# Altium footprint library ICs_VendorSpecific.PcbLib: 247 footprints (part 18 of 19)
Each footprint in its own frame and in the unit in brackets; x right, y up, seen from the top. Pads: shape width x height; smd on the part's side, far side on the other; paste and mask are expansions set on the pad; w line width, h text height; cw(c..) or ccw(c..) is an arc to the next point about the centre after c.
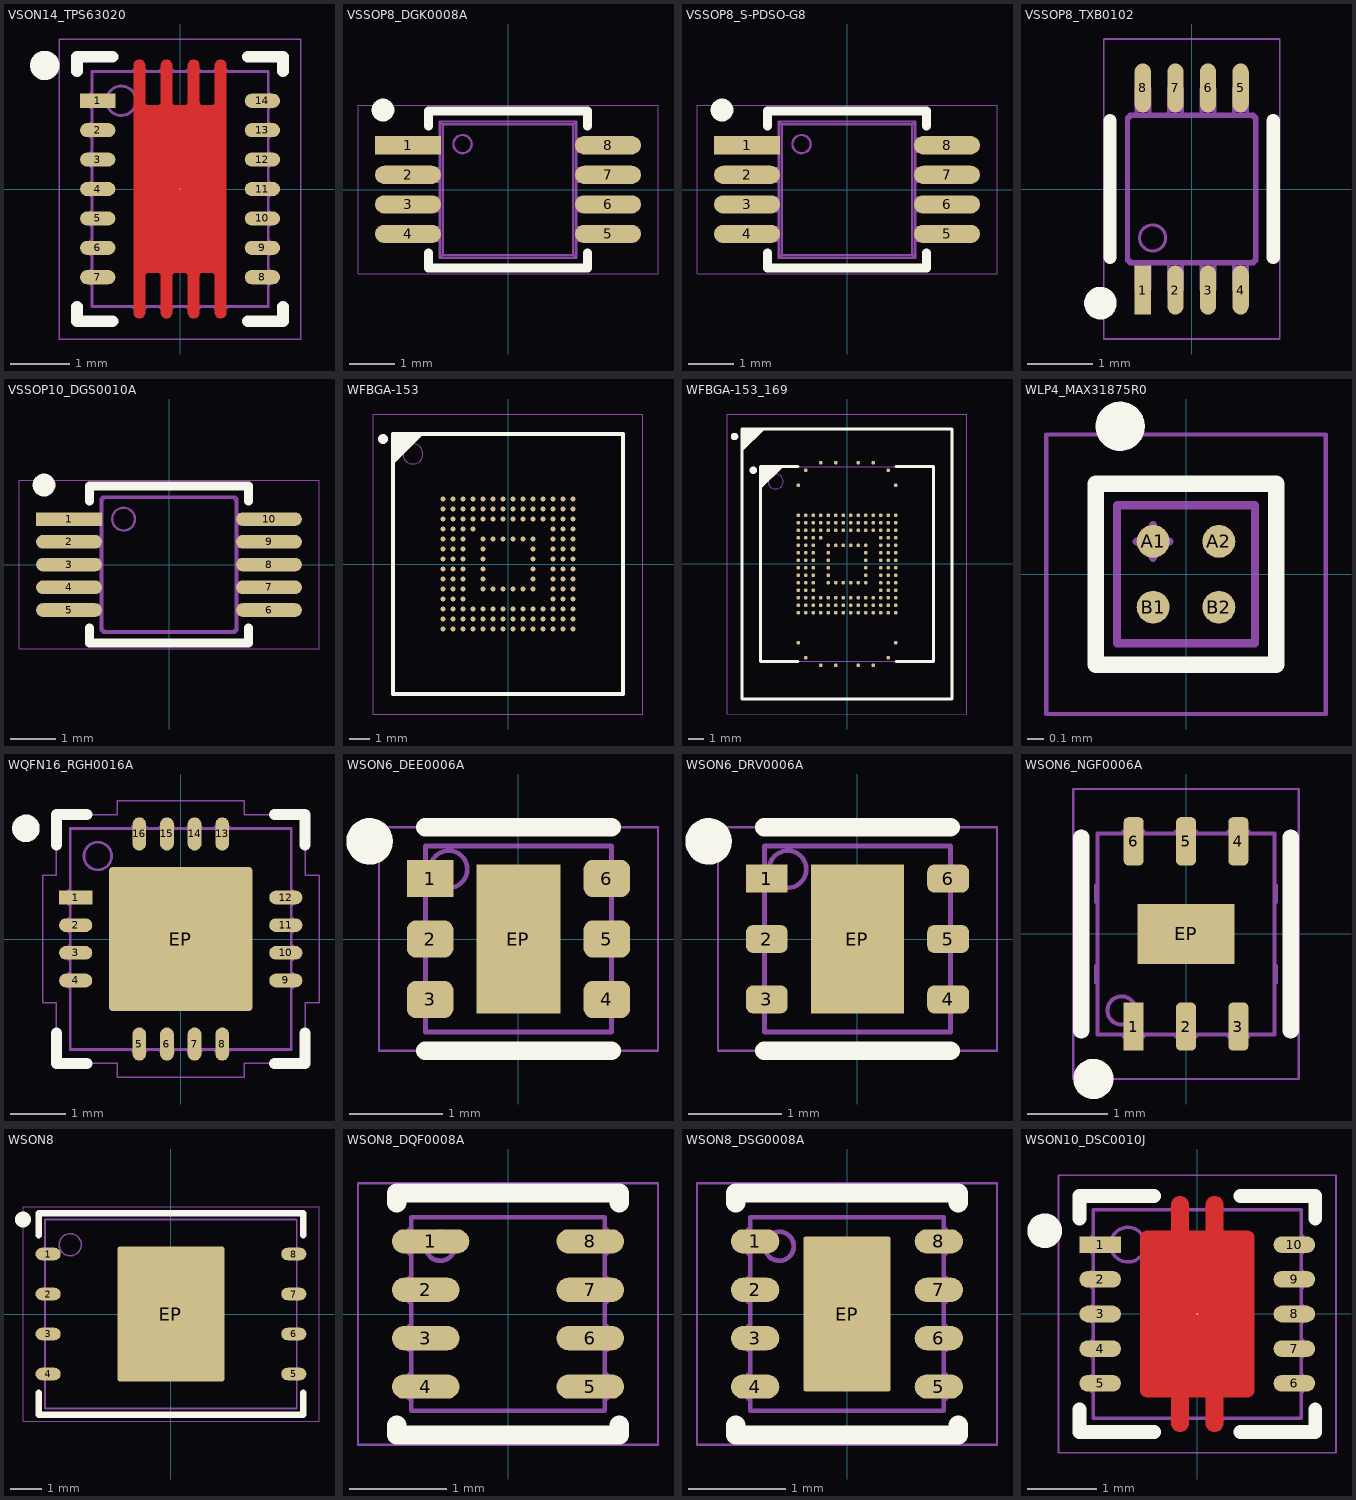
[diagram p17: the footprints below, top view; thin cyan lines are the x and y axes]

## VSON14_TPS63020 [mm] "VSON, 14-Leads, Body 3.00x4.00mm, Exposed Pad 1.58x2.85mm, Pitch 0.5mm. TI case style R-PVSON-N14"
height 1
pads (15):
  rect 0.6x0.24 smd paste+0 mask+0.05: 1(-1.4,1.5)
  oval 0.6x0.24 smd paste+0 mask+0.05: 2(-1.4,1) 3(-1.4,0.5) 4(-1.4,0) 5(-1.4,-0.5) 6(-1.4,-1) 7(-1.4,-1.5) 8(1.4,-1.5) 9(1.4,-1) 10(1.4,-0.5) 11(1.4,0) 12(1.4,0.5) 13(1.4,1) 14(1.4,1.5)
  round 0.025 smd paste-2 mask+0.05: EP(0,0)
Top Layer:
  region: 184 vertices and 0 holes, not listed, extent -0.79,-2.2 0.79,2.2
Top Overlay:
  circle w0.25: c-2.3,2.1 r0.125
  lines w0.2: -1.75,-2 -1.75,-2.25 -1.15,-2.25 ; -1.75,2 -1.75,2.25 -1.15,2.25 ; 1.15,-2.25 1.75,-2.25 1.75,-2 ; 1.15,2.25 1.75,2.25 1.75,2
Top Paste:
  drawing of 12 lines, arcs and shapes, not listed
Top Courtyard:
  lines w0.025: -2.05,-2.55 -2.05,2.55 2.05,2.55 2.05,-2.55 -2.05,-2.55
Top Assembly:
  circle w0.05: c-1,1.5 r0.25
  lines w0.05: -1.5,-1.62 -1.52,-1.62 -1.52,-1.38 -1.5,-1.38 ; -1.5,-1.12 -1.52,-1.12 -1.52,-0.88 -1.5,-0.88 ; -1.5,-0.62 -1.52,-0.62 -1.52,-0.38 -1.5,-0.38 ; -1.5,-0.12 -1.52,-0.12 -1.52,0.12 -1.5,0.12 ; -1.5,0.38 -1.52,0.38 -1.52,0.62 -1.5,0.62 ; -1.5,0.88 -1.52,0.88 -1.52,1.12 -1.5,1.12 ; -1.5,1.38 -1.52,1.38 -1.52,1.62 -1.5,1.62 ; -0.79,-2 -0.79,-2.02 -0.59,-2.02 -0.59,-2 ; -0.79,2 -0.79,2.02 -0.59,2.02 -0.59,2 ; -0.33,-2 -0.33,-2.02 -0.13,-2.02 -0.13,-2 ; -0.33,2 -0.33,2.02 -0.13,2.02 -0.13,2 ; 0.13,-2 0.13,-2.02 0.33,-2.02 0.33,-2 ; 0.13,2 0.13,2.02 0.33,2.02 0.33,2 ; 0.59,-2 0.59,-2.02 0.79,-2.02 0.79,-2 ; 0.59,2 0.59,2.02 0.79,2.02 0.79,2 ; 1.5,-1.62 1.52,-1.62 1.52,-1.38 1.5,-1.38 ; 1.5,-1.12 1.52,-1.12 1.52,-0.88 1.5,-0.88 ; 1.5,-0.62 1.52,-0.62 1.52,-0.38 1.5,-0.38 ; 1.5,-0.12 1.52,-0.12 1.52,0.12 1.5,0.12 ; 1.5,0.38 1.52,0.38 1.52,0.62 1.5,0.62 ; 1.5,0.88 1.52,0.88 1.52,1.12 1.5,1.12 ; 1.5,1.38 1.52,1.38 1.52,1.62 1.5,1.62 ; -1.5,-2 -1.5,2 1.5,2 1.5,-2 -1.5,-2
  text ".Designator" at 0.339,-3.378 h1.5
3D body "R-PVSON-N14.x_t": height 1.02, standoff 0, extent -1.52,-2.02 1.52,2.02

## VSSOP8_DGK0008A [mm] "MSOP, 8-Leads, Body 3.00x3.00mm, Pitch 0.65mm, TI case DGK0008A"
height 1.1
pads (8):
  rect 1.45x0.4 smd paste+0 mask+0.05: 1(-2.2,0.975)
  oval 1.45x0.4 smd paste+0 mask+0.05: 2(-2.2,0.325) 3(-2.2,-0.325) 4(-2.2,-0.975) 5(2.2,-0.975) 6(2.2,-0.325) 7(2.2,0.325) 8(2.2,0.975)
Top Overlay:
  circle w0.25: c-2.75,1.75 r0.125
  lines w0.2: -1.75,-1.4 -1.75,-1.725 1.75,-1.725 1.75,-1.4 ; -1.75,1.4 -1.75,1.725 1.75,1.725 1.75,1.4
Top Courtyard:
  lines w0.025: -3.3,-1.85 3.3,-1.85 3.3,1.85 -3.3,1.85 -3.3,-1.85
Top Assembly:
  circle w0.05: c-1,1 r0.2
  lines w0.05: -2.1,-1.125 -2,-1.125 ; -2.1,-1.125 -2.1,-0.825 ; -2.1,-1.125 -2.5,-1.125 -2.5,-0.825 -2.1,-0.825 ; -2.1,-0.825 -2,-0.825 ; -2.1,-0.475 -2,-0.475 ; -2.1,-0.475 -2.1,-0.175 ; -2.1,-0.475 -2.5,-0.475 -2.5,-0.175 -2.1,-0.175 ; -2.1,-0.175 -2,-0.175 ; -2.1,0.175 -2,0.175 ; -2.1,0.175 -2.1,0.475 ; -2.1,0.175 -2.5,0.175 -2.5,0.475 -2.1,0.475 ; -2.1,0.475 -2,0.475 ; -2.1,0.825 -2,0.825 ; -2.1,0.825 -2.1,1.125 ; -2.1,0.825 -2.5,0.825 -2.5,1.125 -2.1,1.125 ; -2.1,1.125 -2,1.125 ; -2,-1.125 -1.8,-1.125 ; -2,-1.125 -2,-0.825 ; -2,-0.825 -1.8,-0.825 ; -2,-0.475 -1.8,-0.475 ; -2,-0.475 -2,-0.175 ; -2,-0.175 -1.8,-0.175 ; -2,0.175 -1.8,0.175 ; -2,0.175 -2,0.475 ; -2,0.475 -1.8,0.475 ; -2,0.825 -1.8,0.825 ; -2,0.825 -2,1.125 ; -2,1.125 -1.8,1.125 ; -1.8,-1.125 -1.8,-0.825 ; -1.8,-1.125 -1.5,-1.125 ; -1.8,-0.825 -1.5,-0.825 ; -1.8,-0.475 -1.8,-0.175 ; -1.8,-0.475 -1.5,-0.475 ; -1.8,-0.175 -1.5,-0.175 ; -1.8,0.175 -1.8,0.475 ; -1.8,0.175 -1.5,0.175 ; -1.8,0.475 -1.5,0.475 ; -1.8,0.825 -1.8,1.125 ; -1.8,0.825 -1.5,0.825 ; -1.8,1.125 -1.5,1.125 ; -1.5,-1.5 1.5,-1.5 ; -1.5,-1.5 -1.438,-1.438 ; -1.5,-1.5 -1.5,-1.125 ; -1.5,-1.125 -1.5,-0.825 ; -1.5,-0.825 -1.5,-0.475 ; -1.5,-0.475 -1.5,-0.175 ; -1.5,-0.175 -1.5,0.175 ; -1.5,0.175 -1.5,0.475 ; -1.5,0.475 -1.5,0.825 ; -1.5,0.825 -1.5,1.125 ; -1.5,1.125 -1.5,1.5 ; -1.5,1.5 1.5,1.5 ; -1.5,1.5 -1.438,1.438 ; -1.438,-1.438 1.438,-1.438 ; -1.438,-1.438 -1.438,1.438 ; -1.438,1.438 1.438,1.438 ; 1.438,-1.438 1.438,1.438 ; 1.438,-1.438 1.5,-1.5 ; 1.438,1.438 1.5,1.5 ; 1.5,-1.5 1.5,-1.125 ; 1.5,-1.125 1.8,-1.125 ; 1.5,-1.125 1.5,-0.825 ; 1.5,-0.825 1.8,-0.825 ; 1.5,-0.825 1.5,-0.475 ; 1.5,-0.475 1.8,-0.475 ; 1.5,-0.475 1.5,-0.175 ; 1.5,-0.175 1.5,0.175 ; 1.5,-0.175 1.8,-0.175 ; 1.5,0.175 1.8,0.175 ; 1.5,0.175 1.5,0.475 ; 1.5,0.475 1.8,0.475 ; 1.5,0.475 1.5,0.825 ; 1.5,0.825 1.8,0.825 ; 1.5,0.825 1.5,1.125 ; 1.5,1.125 1.8,1.125 ; 1.5,1.125 1.5,1.5 ; 1.8,-1.125 1.8,-0.825 ; 1.8,-1.125 2,-1.125 ; 1.8,-0.825 2,-0.825 ; 1.8,-0.475 1.8,-0.175 ; 1.8,-0.475 2,-0.475 ; 1.8,-0.175 2,-0.175 ; 1.8,0.175 1.8,0.475 ; 1.8,0.175 2,0.175 ; 1.8,0.475 2,0.475 ; 1.8,0.825 1.8,1.125 ; 1.8,0.825 2,0.825 ; 1.8,1.125 2,1.125 ; 2,-1.125 2.1,-1.125 ; 2,-1.125 2,-0.825 ; 2,-0.825 2.1,-0.825 ; 2,-0.475 2.1,-0.475 ; 2,-0.475 2,-0.175 ; 2,-0.175 2.1,-0.175 ; 2,0.175 2.1,0.175 ; 2,0.175 2,0.475 ; 2,0.475 2.1,0.475 ; 2,0.825 2.1,0.825 ; 2,0.825 2,1.125 ; 2,1.125 2.1,1.125 ; 2.1,-1.125 2.1,-0.825 ; 2.1,-1.125 2.5,-1.125 2.5,-0.825 2.1,-0.825 ; 2.1,-0.475 2.1,-0.175 ; 2.1,-0.475 2.5,-0.475 2.5,-0.175 2.1,-0.175 ; 2.1,0.175 2.1,0.475 ; 2.1,0.175 2.5,0.175 2.5,0.475 2.1,0.475 ; 2.1,0.825 2.1,1.125 ; 2.1,0.825 2.5,0.825 2.5,1.125 2.1,1.125
  text ".Designator" at -3.378,-0.339 h1.5
3D body "VSSOP-8(DGK0008A)_X_T.x_t": height 1.18, standoff -0.02, extent -2.45,-1.5 2.45,1.5

## VSSOP8_S-PDSO-G8 [mm] "MSOP, 8-Leads, Body 3.00x3.00mm, Pitch 0.65mm, TI case S-PDSO-G8"
height 1.1
pads (8):
  rect 1.45x0.4 smd paste+0 mask+0.05: 1(-2.2,0.975)
  oval 1.45x0.4 smd paste+0 mask+0.05: 2(-2.2,0.325) 3(-2.2,-0.325) 4(-2.2,-0.975) 5(2.2,-0.975) 6(2.2,-0.325) 7(2.2,0.325) 8(2.2,0.975)
Top Overlay:
  circle w0.25: c-2.75,1.75 r0.125
  lines w0.2: -1.75,-1.4 -1.75,-1.725 1.75,-1.725 1.75,-1.4 ; -1.75,1.4 -1.75,1.725 1.75,1.725 1.75,1.4
Top Courtyard:
  lines w0.025: -3.3,-1.85 -3.3,1.85 3.3,1.85 3.3,-1.85 -3.3,-1.85
Top Assembly:
  circle w0.05: c-1,1 r0.2
  lines w0.05: -2.1,-1.125 -2.5,-1.125 -2.5,-0.825 -2.1,-0.825 ; -2.1,-1.125 -2.1,-0.825 ; -2.1,-1.125 -2,-1.125 ; -2.1,-0.825 -2,-0.825 ; -2.1,-0.475 -2.5,-0.475 -2.5,-0.175 -2.1,-0.175 ; -2.1,-0.475 -2.1,-0.175 ; -2.1,-0.475 -2,-0.475 ; -2.1,-0.175 -2,-0.175 ; -2.1,0.175 -2.5,0.175 -2.5,0.475 -2.1,0.475 ; -2.1,0.175 -2.1,0.475 ; -2.1,0.175 -2,0.175 ; -2.1,0.475 -2,0.475 ; -2.1,0.825 -2.5,0.825 -2.5,1.125 -2.1,1.125 ; -2.1,0.825 -2.1,1.125 ; -2.1,0.825 -2,0.825 ; -2.1,1.125 -2,1.125 ; -2,-1.125 -2,-0.825 ; -2,-1.125 -1.8,-1.125 ; -2,-0.825 -1.8,-0.825 ; -2,-0.475 -2,-0.175 ; -2,-0.475 -1.8,-0.475 ; -2,-0.175 -1.8,-0.175 ; -2,0.175 -2,0.475 ; -2,0.175 -1.8,0.175 ; -2,0.475 -1.8,0.475 ; -2,0.825 -2,1.125 ; -2,0.825 -1.8,0.825 ; -2,1.125 -1.8,1.125 ; -1.8,-1.125 -1.5,-1.125 ; -1.8,-1.125 -1.8,-0.825 ; -1.8,-0.825 -1.5,-0.825 ; -1.8,-0.475 -1.5,-0.475 ; -1.8,-0.475 -1.8,-0.175 ; -1.8,-0.175 -1.5,-0.175 ; -1.8,0.175 -1.5,0.175 ; -1.8,0.175 -1.8,0.475 ; -1.8,0.475 -1.5,0.475 ; -1.8,0.825 -1.5,0.825 ; -1.8,0.825 -1.8,1.125 ; -1.8,1.125 -1.5,1.125 ; -1.5,-1.5 -1.5,-1.125 ; -1.5,-1.5 -1.438,-1.438 ; -1.5,-1.5 1.5,-1.5 ; -1.5,-1.125 -1.5,-0.825 ; -1.5,-0.825 -1.5,-0.475 ; -1.5,-0.475 -1.5,-0.175 ; -1.5,-0.175 -1.5,0.175 ; -1.5,0.175 -1.5,0.475 ; -1.5,0.475 -1.5,0.825 ; -1.5,0.825 -1.5,1.125 ; -1.5,1.125 -1.5,1.5 ; -1.5,1.5 -1.438,1.438 ; -1.5,1.5 1.5,1.5 ; -1.438,-1.438 -1.438,1.438 ; -1.438,-1.438 1.438,-1.438 ; -1.438,1.438 1.438,1.438 ; 1.438,-1.438 1.5,-1.5 ; 1.438,-1.438 1.438,1.438 ; 1.438,1.438 1.5,1.5 ; 1.5,-1.5 1.5,-1.125 ; 1.5,-1.125 1.5,-0.825 ; 1.5,-1.125 1.8,-1.125 ; 1.5,-0.825 1.5,-0.475 ; 1.5,-0.825 1.8,-0.825 ; 1.5,-0.475 1.5,-0.175 ; 1.5,-0.475 1.8,-0.475 ; 1.5,-0.175 1.8,-0.175 ; 1.5,-0.175 1.5,0.175 ; 1.5,0.175 1.5,0.475 ; 1.5,0.175 1.8,0.175 ; 1.5,0.475 1.5,0.825 ; 1.5,0.475 1.8,0.475 ; 1.5,0.825 1.5,1.125 ; 1.5,0.825 1.8,0.825 ; 1.5,1.125 1.5,1.5 ; 1.5,1.125 1.8,1.125 ; 1.8,-1.125 2,-1.125 ; 1.8,-1.125 1.8,-0.825 ; 1.8,-0.825 2,-0.825 ; 1.8,-0.475 2,-0.475 ; 1.8,-0.475 1.8,-0.175 ; 1.8,-0.175 2,-0.175 ; 1.8,0.175 2,0.175 ; 1.8,0.175 1.8,0.475 ; 1.8,0.475 2,0.475 ; 1.8,0.825 2,0.825 ; 1.8,0.825 1.8,1.125 ; 1.8,1.125 2,1.125 ; 2,-1.125 2,-0.825 ; 2,-1.125 2.1,-1.125 ; 2,-0.825 2.1,-0.825 ; 2,-0.475 2,-0.175 ; 2,-0.475 2.1,-0.475 ; 2,-0.175 2.1,-0.175 ; 2,0.175 2,0.475 ; 2,0.175 2.1,0.175 ; 2,0.475 2.1,0.475 ; 2,0.825 2,1.125 ; 2,0.825 2.1,0.825 ; 2,1.125 2.1,1.125 ; 2.1,-1.125 2.5,-1.125 2.5,-0.825 2.1,-0.825 ; 2.1,-1.125 2.1,-0.825 ; 2.1,-0.475 2.5,-0.475 2.5,-0.175 2.1,-0.175 ; 2.1,-0.475 2.1,-0.175 ; 2.1,0.175 2.5,0.175 2.5,0.475 2.1,0.475 ; 2.1,0.175 2.1,0.475 ; 2.1,0.825 2.5,0.825 2.5,1.125 2.1,1.125 ; 2.1,0.825 2.1,1.125
  text ".Designator" at -3.378,-0.339 h1.5
3D body "VSSOP-8(S-PDSO-S8)_X_T.x_t": height 1.18, standoff -0.02, extent -2.45,-1.5 2.45,1.5

## VSSOP8_TXB0102 [mm] "VSSOP, 8-Leads, Body 2.00x2.30mm, Pitch 0.5mm, TI Ref S-PDSO-G8"
height 0.75
pads (8):
  rect 0.25x0.75 smd paste+0 mask+0.05: 1(-0.75,-1.55)
  oval 0.25x0.75 smd paste+0 mask+0.05: 2(-0.25,-1.55) 3(0.25,-1.55) 4(0.75,-1.55) 5(0.75,1.55) 6(0.25,1.55) 7(-0.25,1.55) 8(-0.75,1.55)
Top Overlay:
  circle w0.25: c-1.4,-1.75 r0.125
  lines w0.2: -1.25,-1.05 -1.25,1.05 ; 1.25,-1.05 1.25,1.05
Top Courtyard:
  lines w0.025: -1.35,-2.3 -1.35,2.3 1.35,2.3 1.35,-2.3 -1.35,-2.3
Top Assembly:
  circle w0.05: c-0.6,-0.75 r0.2
  lines w0.05: -0.949,-1.15 -0.917,-1.117 ; -0.949,1.15 -0.917,1.117 ; -0.855,-1.452 -0.645,-1.452 ; -0.855,-1.392 -0.645,-1.392 ; -0.855,-1.335 -0.645,-1.335 ; -0.855,-1.208 -0.645,-1.208 ; -0.855,-1.15 -0.855,-1.55 -0.645,-1.55 -0.645,-1.15 ; -0.855,1.15 -0.855,1.55 -0.645,1.55 -0.645,1.15 ; -0.855,1.208 -0.645,1.208 ; -0.855,1.335 -0.645,1.335 ; -0.855,1.392 -0.645,1.392 ; -0.855,1.452 -0.645,1.452 ; -0.355,-1.452 -0.145,-1.452 ; -0.355,-1.392 -0.145,-1.392 ; -0.355,-1.335 -0.145,-1.335 ; -0.355,-1.208 -0.145,-1.208 ; -0.355,-1.15 -0.355,-1.55 -0.145,-1.55 -0.145,-1.15 ; -0.355,1.15 -0.355,1.55 -0.145,1.55 -0.145,1.15 ; -0.355,1.208 -0.145,1.208 ; -0.355,1.335 -0.145,1.335 ; -0.355,1.392 -0.145,1.392 ; -0.355,1.452 -0.145,1.452 ; 0.145,-1.452 0.355,-1.452 ; 0.145,-1.392 0.355,-1.392 ; 0.145,-1.335 0.355,-1.335 ; 0.145,-1.208 0.355,-1.208 ; 0.145,-1.15 0.145,-1.55 0.355,-1.55 0.355,-1.15 ; 0.145,1.15 0.145,1.55 0.355,1.55 0.355,1.15 ; 0.145,1.208 0.355,1.208 ; 0.145,1.335 0.355,1.335 ; 0.145,1.392 0.355,1.392 ; 0.145,1.452 0.355,1.452 ; 0.645,-1.452 0.855,-1.452 ; 0.645,-1.392 0.855,-1.392 ; 0.645,-1.335 0.855,-1.335 ; 0.645,-1.208 0.855,-1.208 ; 0.645,-1.15 0.645,-1.55 0.855,-1.55 0.855,-1.15 ; 0.645,1.15 0.645,1.55 0.855,1.55 0.855,1.15 ; 0.645,1.208 0.855,1.208 ; 0.645,1.335 0.855,1.335 ; 0.645,1.392 0.855,1.392 ; 0.645,1.452 0.855,1.452 ; 1,-1.099 0.967,-1.067 ; 1,1.099 0.967,1.067 ; -1,-1.1 -1,1.1 ; -1,-1.1 -0.967,-1.067 ; -1,-1.1 -0.95,-1.15 0.95,-1.15 ; -1,1.1 -0.95,1.15 0.95,1.15 ; -1,1.1 -0.967,1.067 ; -0.967,-1.067 -0.967,1.067 ; -0.967,-1.067 -0.917,-1.117 ; -0.967,1.067 -0.917,1.117 ; -0.917,-1.117 0.917,-1.117 ; -0.917,1.117 0.917,1.117 ; 0.917,-1.117 0.967,-1.067 ; 0.917,-1.117 0.95,-1.15 ; 0.917,1.117 0.95,1.15 ; 0.917,1.117 0.967,1.067 ; 0.95,-1.15 1,-1.1 1,1.1 0.95,1.15 ; 0.967,-1.067 0.967,1.067
  text ".Designator" at -3.378,-0.339 h1.5
3D body "VSSOP8_R-PDSO-G8.x_t": height 0.87, standoff 0, extent -1,-1.55 1,1.55

## VSSOP10_DGS0010A [mm] "VSSOP, 10-Leads, Body 3.00x3.00mm, Pitch 0.5mm, TI case DGS0010A"
height 1
pads (10):
  rect 1.45x0.3 smd paste+0 mask+0.05: 1(-2.2,1)
  oval 1.45x0.3 smd paste+0 mask+0.05: 2(-2.2,0.5) 3(-2.2,0) 4(-2.2,-0.5) 5(-2.2,-1) 6(2.2,-1) 7(2.2,-0.5) 8(2.2,0) 9(2.2,0.5) 10(2.2,1)
Top Overlay:
  circle w0.25: c-2.75,1.75 r0.125
  lines w0.2: -1.75,-1.4 -1.75,-1.725 1.75,-1.725 1.75,-1.4 ; -1.75,1.4 -1.75,1.725 1.75,1.725 1.75,1.4
Top Courtyard:
  lines w0.025: -3.3,-1.85 3.3,-1.85 3.3,1.85 -3.3,1.85 -3.3,-1.85
Top Assembly:
  circle w0.05: c-1,1 r0.25
  lines w0.05: -2.127,-1.11 -2.127,-0.89 ; -2.127,-0.61 -2.127,-0.39 ; -2.127,-0.11 -2.127,0.11 ; -2.127,0.39 -2.127,0.61 ; -2.127,0.89 -2.127,1.11 ; -2.06,-1.11 -2.06,-0.89 ; -2.06,-0.61 -2.06,-0.39 ; -2.06,-0.11 -2.06,0.11 ; -2.06,0.39 -2.06,0.61 ; -2.06,0.89 -2.06,1.11 ; -1.981,-1.11 -1.981,-0.89 ; -1.981,-0.61 -1.981,-0.39 ; -1.981,-0.11 -1.981,0.11 ; -1.981,0.39 -1.981,0.61 ; -1.981,0.89 -1.981,1.11 ; -1.807,-1.11 -1.807,-0.89 ; -1.807,-0.61 -1.807,-0.39 ; -1.807,-0.11 -1.807,0.11 ; -1.807,0.39 -1.807,0.61 ; -1.807,0.89 -1.807,1.11 ; -1.5,-1.449 -1.464,-1.414 ; -1.5,-1.11 -2.45,-1.11 -2.45,-0.89 -1.5,-0.89 ; -1.5,-0.61 -2.45,-0.61 -2.45,-0.39 -1.5,-0.39 ; -1.5,-0.11 -2.45,-0.11 -2.45,0.11 -1.5,0.11 ; -1.5,0.39 -2.45,0.39 -2.45,0.61 -1.5,0.61 ; -1.5,0.89 -2.45,0.89 -2.45,1.11 -1.5,1.11 ; -1.449,1.5 -1.414,1.464 ; 1.449,1.5 1.414,1.464 ; 1.5,-1.449 1.464,-1.414 ; 1.5,-1.11 2.45,-1.11 2.45,-0.89 1.5,-0.89 ; 1.5,-0.61 2.45,-0.61 2.45,-0.39 1.5,-0.39 ; 1.5,-0.11 2.45,-0.11 2.45,0.11 1.5,0.11 ; 1.5,0.39 2.45,0.39 2.45,0.61 1.5,0.61 ; 1.5,0.89 2.45,0.89 2.45,1.11 1.5,1.11 ; 1.807,-1.11 1.807,-0.89 ; 1.807,-0.61 1.807,-0.39 ; 1.807,-0.11 1.807,0.11 ; 1.807,0.39 1.807,0.61 ; 1.807,0.89 1.807,1.11 ; 1.981,-1.11 1.981,-0.89 ; 1.981,-0.61 1.981,-0.39 ; 1.981,-0.11 1.981,0.11 ; 1.981,0.39 1.981,0.61 ; 1.981,0.89 1.981,1.11 ; 2.06,-1.11 2.06,-0.89 ; 2.06,-0.61 2.06,-0.39 ; 2.06,-0.11 2.06,0.11 ; 2.06,0.39 2.06,0.61 ; 2.06,0.89 2.06,1.11 ; 2.127,-1.11 2.127,-0.89 ; 2.127,-0.61 2.127,-0.39 ; 2.127,-0.11 2.127,0.11 ; 2.127,0.39 2.127,0.61 ; 2.127,0.89 2.127,1.11 ; -1.5,1.45 -1.464,1.414 ; -1.5,1.45 -1.5,-1.45 -1.45,-1.5 ; -1.5,1.45 -1.45,1.5 1.45,1.5 1.5,1.45 ; -1.464,-1.414 -1.464,1.414 ; -1.464,-1.414 -1.414,-1.464 ; -1.464,1.414 -1.414,1.464 ; -1.45,-1.5 -1.414,-1.464 ; -1.45,-1.5 1.45,-1.5 ; -1.414,-1.464 1.414,-1.464 ; -1.414,1.464 1.414,1.464 ; 1.414,-1.464 1.464,-1.414 ; 1.414,-1.464 1.45,-1.5 ; 1.414,1.464 1.464,1.414 ; 1.45,-1.5 1.5,-1.45 1.5,1.45 ; 1.464,-1.414 1.464,1.414 ; 1.464,1.414 1.5,1.45
  text ".Designator" at -3.378,-0.339 h1.5
3D body "VSSOP10_DGS0010A.x_t": height 1.1, standoff 0, extent -2.45,-1.5 2.45,1.5

## WFBGA-153 [mm] "WFBGA-153, 153-Leads, Body 11.50x13.00mm, Pitch 0.50mm"
height 3.5
pads (153):
  round 0.25 smd mask+0.05: A1(-3.25,3.25) A2(-2.75,3.25) A3(-2.25,3.25) A4(-1.75,3.25) A5(-1.25,3.25) A6(-0.75,3.25) A7(-0.25,3.25) A8(0.25,3.25) A9(0.75,3.25) A10(1.25,3.25) A11(1.75,3.25) A12(2.25,3.25) A13(2.75,3.25) A14(3.25,3.25) B1(-3.25,2.75) B2(-2.75,2.75) B3(-2.25,2.75) B4(-1.75,2.75) B5(-1.25,2.75) B6(-0.75,2.75) B7(-0.25,2.75) B8(0.25,2.75) B9(0.75,2.75) B10(1.25,2.75) B11(1.75,2.75) B12(2.25,2.75) B13(2.75,2.75) B14(3.25,2.75) C1(-3.25,2.25) C2(-2.75,2.25) C3(-2.25,2.25) C4(-1.75,2.25) C5(-1.25,2.25) C6(-0.75,2.25) C7(-0.25,2.25) C8(0.25,2.25) C9(0.75,2.25) C10(1.25,2.25) C11(1.75,2.25) C12(2.25,2.25) C13(2.75,2.25) C14(3.25,2.25) D1(-3.25,1.75) D2(-2.75,1.75) D3(-2.25,1.75) D4(-1.75,1.75) D12(2.25,1.75) D13(2.75,1.75) D14(3.25,1.75) E1(-3.25,1.25) E2(-2.75,1.25) E3(-2.25,1.25) E5(-1.25,1.25) E6(-0.75,1.25) E7(-0.25,1.25) E8(0.25,1.25) E9(0.75,1.25) E10(1.25,1.25) E12(2.25,1.25) E13(2.75,1.25) E14(3.25,1.25) F1(-3.25,0.75) F2(-2.75,0.75) F3(-2.25,0.75) F5(-1.25,0.75) F10(1.25,0.75) F12(2.25,0.75) F13(2.75,0.75) F14(3.25,0.75) G1(-3.25,0.25) G2(-2.75,0.25) G3(-2.25,0.25) G5(-1.25,0.25) G10(1.25,0.25) G12(2.25,0.25) G13(2.75,0.25) G14(3.25,0.25) H1(-3.25,-0.25) H2(-2.75,-0.25) H3(-2.25,-0.25) H5(-1.25,-0.25) H10(1.25,-0.25) H12(2.25,-0.25) H13(2.75,-0.25) H14(3.25,-0.25) J1(-3.25,-0.75) J2(-2.75,-0.75) J3(-2.25,-0.75) J5(-1.25,-0.75) J10(1.25,-0.75) J12(2.25,-0.75) J13(2.75,-0.75) J14(3.25,-0.75) K1(-3.25,-1.25) K2(-2.75,-1.25) K3(-2.25,-1.25) K5(-1.25,-1.25) K6(-0.75,-1.25) K7(-0.25,-1.25) K8(0.25,-1.25) K9(0.75,-1.25) K10(1.25,-1.25) K12(2.25,-1.25) K13(2.75,-1.25) K14(3.25,-1.25) L1(-3.25,-1.75) L2(-2.75,-1.75) L3(-2.25,-1.75) L12(2.25,-1.75) L13(2.75,-1.75) L14(3.25,-1.75) M1(-3.25,-2.25) M2(-2.75,-2.25) M3(-2.25,-2.25) M4(-1.75,-2.25) M5(-1.25,-2.25) M6(-0.75,-2.25) M7(-0.25,-2.25) M8(0.25,-2.25) M9(0.75,-2.25) M10(1.25,-2.25) M11(1.75,-2.25) M12(2.25,-2.25) M13(2.75,-2.25) M14(3.25,-2.25) N1(-3.25,-2.75) N2(-2.75,-2.75) N3(-2.25,-2.75) N4(-1.75,-2.75) N5(-1.25,-2.75) N6(-0.75,-2.75) N7(-0.25,-2.75) N8(0.25,-2.75) N9(0.75,-2.75) N10(1.25,-2.75) N11(1.75,-2.75) N12(2.25,-2.75) N13(2.75,-2.75) N14(3.25,-2.75) P1(-3.25,-3.25) P2(-2.75,-3.25) P3(-2.25,-3.25) P4(-1.75,-3.25) P5(-1.25,-3.25) P6(-0.75,-3.25) P7(-0.25,-3.25) P8(0.25,-3.25) P9(0.75,-3.25) P10(1.25,-3.25) P11(1.75,-3.25) P12(2.25,-3.25) P13(2.75,-3.25) P14(3.25,-3.25)
Top Overlay:
  circle w0.25: c-6.25,6.25 r0.125
  region: -5.75,6.5 -5.75,5 -4.25,6.5
  lines w0.2: -5.75,-6.5 5.75,-6.5 5.75,6.5 -5.75,6.5 -5.75,-6.5
Top Courtyard:
  lines w0.025: -6.75,-7.5 6.75,-7.5 6.75,7.5 -6.75,7.5 -6.75,-7.5
Top Assembly:
  circle w0.05: c-4.75,5.5 r0.5
  lines w0.05: -5.75,-6.5 -5.75,6.5 5.75,6.5 5.75,-6.5 -5.75,-6.5
  text ".Designator" at -6.763,-0.679 h3
3D body "eMMC_153.x_t": height 0.72, standoff -0.01, extent -5.75,-6.5 5.75,6.5

## WFBGA-153_169 [mm] "WFBGA-153, 153-Leads, Body 11.50x13.00mm, Pitch 0.50mm"
height 3.5
pads (169):
  round 0.25 smd mask+0.05: 169_A4(-1.75,6.75) 169_A6(-0.75,6.75) 169_A9(0.75,6.75) 169_A11(1.75,6.75) 169_AE1(-3.25,-5.25) 169_AE14(3.25,-5.25) 169_AG2(-2.75,-6.25) 169_AG13(2.75,-6.25) 169_AH4(-1.75,-6.75) 169_AH6(-0.75,-6.75) 169_AH9(0.75,-6.75) 169_AH11(1.75,-6.75) 169_B2(-2.75,6.25) 169_B13(2.75,6.25) 169_D1(-3.25,5.25) 169_D14(3.25,5.25) A1(-3.25,3.25) A2(-2.75,3.25) A3(-2.25,3.25) A4(-1.75,3.25) A5(-1.25,3.25) A6(-0.75,3.25) A7(-0.25,3.25) A8(0.25,3.25) A9(0.75,3.25) A10(1.25,3.25) A11(1.75,3.25) A12(2.25,3.25) A13(2.75,3.25) A14(3.25,3.25) B1(-3.25,2.75) B2(-2.75,2.75) B3(-2.25,2.75) B4(-1.75,2.75) B5(-1.25,2.75) B6(-0.75,2.75) B7(-0.25,2.75) B8(0.25,2.75) B9(0.75,2.75) B10(1.25,2.75) B11(1.75,2.75) B12(2.25,2.75) B13(2.75,2.75) B14(3.25,2.75) C1(-3.25,2.25) C2(-2.75,2.25) C3(-2.25,2.25) C4(-1.75,2.25) C5(-1.25,2.25) C6(-0.75,2.25) C7(-0.25,2.25) C8(0.25,2.25) C9(0.75,2.25) C10(1.25,2.25) C11(1.75,2.25) C12(2.25,2.25) C13(2.75,2.25) C14(3.25,2.25) D1(-3.25,1.75) D2(-2.75,1.75) D3(-2.25,1.75) D4(-1.75,1.75) D12(2.25,1.75) D13(2.75,1.75) D14(3.25,1.75) E1(-3.25,1.25) E2(-2.75,1.25) E3(-2.25,1.25) E5(-1.25,1.25) E6(-0.75,1.25) E7(-0.25,1.25) E8(0.25,1.25) E9(0.75,1.25) E10(1.25,1.25) E12(2.25,1.25) E13(2.75,1.25) E14(3.25,1.25) F1(-3.25,0.75) F2(-2.75,0.75) F3(-2.25,0.75) F5(-1.25,0.75) F10(1.25,0.75) F12(2.25,0.75) F13(2.75,0.75) F14(3.25,0.75) G1(-3.25,0.25) G2(-2.75,0.25) G3(-2.25,0.25) G5(-1.25,0.25) G10(1.25,0.25) G12(2.25,0.25) G13(2.75,0.25) G14(3.25,0.25) H1(-3.25,-0.25) H2(-2.75,-0.25) H3(-2.25,-0.25) H5(-1.25,-0.25) H10(1.25,-0.25) H12(2.25,-0.25) H13(2.75,-0.25) H14(3.25,-0.25) J1(-3.25,-0.75) J2(-2.75,-0.75) J3(-2.25,-0.75) J5(-1.25,-0.75) J10(1.25,-0.75) J12(2.25,-0.75) J13(2.75,-0.75) J14(3.25,-0.75) K1(-3.25,-1.25) K2(-2.75,-1.25) K3(-2.25,-1.25) K5(-1.25,-1.25) K6(-0.75,-1.25) K7(-0.25,-1.25) K8(0.25,-1.25) K9(0.75,-1.25) K10(1.25,-1.25) K12(2.25,-1.25) K13(2.75,-1.25) K14(3.25,-1.25) L1(-3.25,-1.75) L2(-2.75,-1.75) L3(-2.25,-1.75) L12(2.25,-1.75) L13(2.75,-1.75) L14(3.25,-1.75) M1(-3.25,-2.25) M2(-2.75,-2.25) M3(-2.25,-2.25) M4(-1.75,-2.25) M5(-1.25,-2.25) M6(-0.75,-2.25) M7(-0.25,-2.25) M8(0.25,-2.25) M9(0.75,-2.25) M10(1.25,-2.25) M11(1.75,-2.25) M12(2.25,-2.25) M13(2.75,-2.25) M14(3.25,-2.25) N1(-3.25,-2.75) N2(-2.75,-2.75) N3(-2.25,-2.75) N4(-1.75,-2.75) N5(-1.25,-2.75) N6(-0.75,-2.75) N7(-0.25,-2.75) N8(0.25,-2.75) N9(0.75,-2.75) N10(1.25,-2.75) N11(1.75,-2.75) N12(2.25,-2.75) N13(2.75,-2.75) N14(3.25,-2.75) P1(-3.25,-3.25) P2(-2.75,-3.25) P3(-2.25,-3.25) P4(-1.75,-3.25) P5(-1.25,-3.25) P6(-0.75,-3.25) P7(-0.25,-3.25) P8(0.25,-3.25) P9(0.75,-3.25) P10(1.25,-3.25) P11(1.75,-3.25) P12(2.25,-3.25) P13(2.75,-3.25) P14(3.25,-3.25)
Top Overlay:
  circle w0.25: c-6.25,6.25 r0.125
  circle w0.25: c-7.5,8.5 r0.125
  region: -7,9 -7,7.5 -5.5,9
  region: -5.75,6.5 -5.75,5 -4.25,6.5
  lines w0.2: -3.25,-6.5 -5.75,-6.5 -5.75,6.5 -3.25,6.5 ; 3.25,-6.5 5.75,-6.5 5.75,6.5 3.25,6.5 ; -7,-9 -7,9 7,9 7,-9 -7,-9
Top Courtyard:
  lines w0.025: -8,-10 8,-10 8,10 -8,10 -8,-10
Top Assembly:
  circle w0.05: c-4.75,5.5 r0.5
  lines w0.05: -5.75,-6.5 5.75,-6.5 5.75,6.5 -5.75,6.5 -5.75,-6.5
  text ".Designator" at -6.763,-0.679 h3
3D body "WFBGA-153.STEP": height 0.8, standoff 0, extent -5.75,-6.5 5.75,6.5

## WLP4_MAX31875R0 [mm] "WLP-4, 4-Leads, Body 0.837x0.837mm, Pitch 0.40mm, Maxim Integrater Reference Z40C0+1"
height 0.35
pads (4):
  round 0.2 smd mask+0.05: A1(-0.2,0.2) A2(0.2,0.2) B1(-0.2,-0.2) B2(0.2,-0.2)
Top Overlay:
  circle w0.15: c-0.4,0.9 r0.075
  lines w0.1: -0.55,-0.55 0.55,-0.55 0.55,0.55 -0.55,0.55 -0.55,-0.55
Top Courtyard:
  lines w0.025: -0.85,-0.85 0.85,-0.85 0.85,0.85 -0.85,0.85 -0.85,-0.85
Top Assembly:
  lines w0.05: -0.3,0.2 -0.1,0.2 ; -0.2,0.1 -0.2,0.3 ; -0.42,-0.42 0.42,-0.42 0.42,0.42 -0.42,0.42 -0.42,-0.42
3D body "WLP4_MAX31875R0.x_t": height 0.35, standoff -0.01, extent -0.42,-0.42 0.42,0.42

## WQFN16_RGH0016A [mm] "Power WQFN 4mm x 4mm, TI case RGH0016A"
height 0.8
pads (17):
  rect 0.6x0.25 smd mask+0.05: 1(-1.9,0.75)
  oval 0.6x0.25 smd mask+0.05: 2(-1.9,0.25) 3(-1.9,-0.25) 4(-1.9,-0.75) 9(1.9,-0.75) 10(1.9,-0.25) 11(1.9,0.25) 12(1.9,0.75)
  oval 0.25x0.6 smd mask+0.05: 5(-0.75,-1.9) 6(-0.25,-1.9) 7(0.25,-1.9) 8(0.75,-1.9) 13(0.75,1.9) 14(0.25,1.9) 15(-0.25,1.9) 16(-0.75,1.9)
  rrect5% 2.6x2.6 smd paste-5 mask+0.05: EP(0,0)
Top Overlay:
  circle w0.25: c-2.8,2 r0.125
  lines w0.2: -2.25,-1.7 -2.25,-2.25 -1.7,-2.25 ; -2.25,1.7 -2.25,2.25 -1.7,2.25 ; 1.7,-2.25 2.25,-2.25 2.25,-1.7 ; 1.7,2.25 2.25,2.25 2.25,1.7
Top Paste:
  region: 0.3,1.1 -0.3,1.1 -0.3,0.5 0.3,0.5
  region: -0.5,1.1 -1.1,1.1 -1.1,0.5 -0.5,0.5
  region: 0.3,0.3 -0.3,0.3 -0.3,-0.3 0.3,-0.3
  region: -0.5,0.3 -1.1,0.3 -1.1,-0.3 -0.5,-0.3
  region: 1.1,1.1 0.5,1.1 0.5,0.5 1.1,0.5
  region: 1.1,0.3 0.5,0.3 0.5,-0.3 1.1,-0.3
  region: 0.3,-0.5 -0.3,-0.5 -0.3,-1.1 0.3,-1.1
  region: -0.5,-0.5 -1.1,-0.5 -1.1,-1.1 -0.5,-1.1
  region: 1.1,-0.5 0.5,-0.5 0.5,-1.1 1.1,-1.1
Top Solder:
  region: 0,0.21 -0.82,0.21 -0.82,-0.21 0,-0.21
Top Courtyard:
  lines w0.025: -2.5,-1.15 -2.25,-1.15 -2.25,-2.25 -1.15,-2.25 -1.15,-2.5 1.15,-2.5 1.15,-2.25 2.25,-2.25 2.25,-1.15 2.5,-1.15 2.5,1.15 2.25,1.15 2.25,2.25 1.15,2.25 1.15,2.5 -1.15,2.5 -1.15,2.25 -2.25,2.25 -2.25,1.15 -2.5,1.15 -2.5,-1.15
Top Assembly:
  circle w0.05: c-1.5,1.5 r0.25
  lines w0.05: -2,-0.875 -2.025,-0.875 -2.025,-0.625 -2,-0.625 ; -2,-0.375 -2.025,-0.375 -2.025,-0.125 -2,-0.125 ; -2,0.125 -2.025,0.125 -2.025,0.375 -2,0.375 ; -2,0.625 -2.025,0.625 -2.025,0.875 -2,0.875 ; -0.875,-2 -0.875,-2.025 -0.625,-2.025 -0.625,-2 ; -0.875,2 -0.875,2.025 -0.625,2.025 -0.625,2 ; -0.375,-2 -0.375,-2.025 -0.125,-2.025 -0.125,-2 ; -0.375,2 -0.375,2.025 -0.125,2.025 -0.125,2 ; 0.125,-2 0.125,-2.025 0.375,-2.025 0.375,-2 ; 0.125,2 0.125,2.025 0.375,2.025 0.375,2 ; 0.625,-2 0.625,-2.025 0.875,-2.025 0.875,-2 ; 0.625,2 0.625,2.025 0.875,2.025 0.875,2 ; 2,-0.875 2.025,-0.875 2.025,-0.625 2,-0.625 ; 2,-0.375 2.025,-0.375 2.025,-0.125 2,-0.125 ; 2,0.125 2.025,0.125 2.025,0.375 2,0.375 ; 2,0.625 2.025,0.625 2.025,0.875 2,0.875 ; -2,-2 2,-2 2,2 -2,2 -2,-2
  text ".Designator" at -3.378,-0.339 h1.5
3D body "RGH0016A.x_t": height 0.85, standoff 0, extent -2.025,-2.025 2.025,2.025

## WSON6_DEE0006A [mm] "DFN 2mm x 2mm, TI case DEE0006A"
height 0.8
pads (7):
  rect 0.5x0.4 smd paste-0.025 mask+0.05: 1(-0.95,0.65)
  rrect50% 0.5x0.4 smd paste-0.025 mask+0.05: 2(-0.95,0) 3(-0.95,-0.65) 4(0.95,-0.65) 5(0.95,0) 6(0.95,0.65)
  rect 0.9x1.6 smd paste-3 mask+0.05: EP(0,0)
Top Overlay:
  circle w0.25: c-1.6,1.05 r0.125
  lines w0.2: -1,-1.2 1,-1.2 ; -1,1.2 1,1.2
Top Paste:
  rectangle: -0.4,0.1 0.4,0.75
  rectangle: -0.4,-0.75 0.4,-0.1
Top Courtyard:
  lines w0.025: -1.5,-1.2 1.5,-1.2 1.5,1.2 -1.5,1.2 -1.5,-1.2
Top Assembly:
  circle w0.05: c-0.75,0.75 r0.2
  lines w0.05: -1,-0.775 -1.025,-0.775 -1.025,-0.748 ; -1,-0.748 -1.025,-0.748 ; -1,-0.552 -1.025,-0.552 ; -1,-0.525 -1.025,-0.525 -1.025,-0.552 ; -1,-0.125 -1.025,-0.125 -1.025,-0.098 ; -1,-0.098 -1.025,-0.098 ; -1,0.098 -1.025,0.098 ; -1,0.125 -1.025,0.125 -1.025,0.098 ; -1,0.525 -1.025,0.525 -1.025,0.552 ; -1,0.552 -1.025,0.552 ; -1,0.748 -1.025,0.748 ; -1,0.775 -1.025,0.775 -1.025,0.748 ; 1,-0.775 1.025,-0.775 1.025,-0.748 ; 1,-0.748 1.025,-0.748 ; 1,-0.552 1.025,-0.552 ; 1,-0.525 1.025,-0.525 1.025,-0.552 ; 1,-0.125 1.025,-0.125 1.025,-0.098 ; 1,-0.098 1.025,-0.098 ; 1,0.098 1.025,0.098 ; 1,0.125 1.025,0.125 1.025,0.098 ; 1,0.525 1.025,0.525 1.025,0.552 ; 1,0.552 1.025,0.552 ; 1,0.748 1.025,0.748 ; 1,0.775 1.025,0.775 1.025,0.748 ; -1.025,-0.748 -1.025,-0.552 ; -1.025,-0.098 -1.025,0.098 ; -1.025,0.552 -1.025,0.748 ; 1.025,-0.748 1.025,-0.552 ; 1.025,-0.098 1.025,0.098 ; 1.025,0.552 1.025,0.748 ; -1,-1 -1,1 1,1 1,-1 -1,-1
  text ".Designator" at -2.252,-0.226 h1
3D body "WSON6_DEE0006A.x_t": height 0.82, standoff 0, extent -1.005,-1.02 1.005,1.02

## WSON6_DRV0006A [mm] "DFN 2mm x 2mm, TI case DRV0006A"
height 0.8
pads (7):
  rect 0.45x0.3 smd paste-0.025 mask+0.05: 1(-0.975,0.65)
  rrect50% 0.45x0.3 smd paste-0.025 mask+0.05: 2(-0.975,0) 3(-0.975,-0.65) 4(0.975,-0.65) 5(0.975,0) 6(0.975,0.65)
  rect 1x1.6 smd paste-3 mask+0.05: EP(0,0)
Top Overlay:
  circle w0.25: c-1.6,1.05 r0.125
  lines w0.2: -1,-1.2 1,-1.2 ; -1,1.2 1,1.2
Top Paste:
  rectangle: -0.4,-0.7 0.4,-0.1
  rectangle: -0.4,0.1 0.4,0.7
Top Courtyard:
  lines w0.025: -1.5,-1.2 -1.5,1.2 1.5,1.2 1.5,-1.2 -1.5,-1.2
Top Assembly:
  circle w0.05: c-0.75,0.75 r0.2
  lines w0.05: -1,-0.775 -1.025,-0.775 -1.025,-0.748 ; -1,-0.748 -1.025,-0.748 ; -1,-0.552 -1.025,-0.552 ; -1,-0.525 -1.025,-0.525 -1.025,-0.552 ; -1,-0.125 -1.025,-0.125 -1.025,-0.098 ; -1,-0.098 -1.025,-0.098 ; -1,0.098 -1.025,0.098 ; -1,0.125 -1.025,0.125 -1.025,0.098 ; -1,0.525 -1.025,0.525 -1.025,0.552 ; -1,0.552 -1.025,0.552 ; -1,0.748 -1.025,0.748 ; -1,0.775 -1.025,0.775 -1.025,0.748 ; 1,-0.775 1.025,-0.775 1.025,-0.748 ; 1,-0.748 1.025,-0.748 ; 1,-0.552 1.025,-0.552 ; 1,-0.525 1.025,-0.525 1.025,-0.552 ; 1,-0.125 1.025,-0.125 1.025,-0.098 ; 1,-0.098 1.025,-0.098 ; 1,0.098 1.025,0.098 ; 1,0.125 1.025,0.125 1.025,0.098 ; 1,0.525 1.025,0.525 1.025,0.552 ; 1,0.552 1.025,0.552 ; 1,0.748 1.025,0.748 ; 1,0.775 1.025,0.775 1.025,0.748 ; -1.025,-0.748 -1.025,-0.552 ; -1.025,-0.098 -1.025,0.098 ; -1.025,0.552 -1.025,0.748 ; 1.025,-0.748 1.025,-0.552 ; 1.025,-0.098 1.025,0.098 ; 1.025,0.552 1.025,0.748 ; -1,-1 1,-1 1,1 -1,1 -1,-1
  text ".Designator" at -2.252,-0.226 h1
3D body "WSON6_DRV0006A.x_t": height 0.85, standoff 0, extent -1.025,-1.025 1.025,1.025

## WSON6_NGF0006A [mm] "WSON-6, 2.5mm x 2.2mm, TI case GF0006A"
height 0.8
pads (7):
  rect 0.25x0.6 smd paste-0.025 mask+0.05: 1(-0.65,-1.15)
  rrect50% 0.25x0.6 smd paste-0.025 mask+0.05: 2(0,-1.15) 3(0.65,-1.15) 4(0.65,1.15) 5(0,1.15) 6(-0.65,1.15)
  rect 1.2x0.75 smd paste-0.025 mask+0.05: EP(0,0)
Top Overlay:
  circle w0.25: c-1.15,-1.8 r0.125
  lines w0.2: -1.3,-1.2 -1.3,1.2 ; 1.3,-1.2 1.3,1.2
Top Courtyard:
  lines w0.025: -1.4,-1.8 1.4,-1.8 1.4,1.8 -1.4,1.8 -1.4,-1.8
Top Assembly:
  circle w0.05: c-0.8,-0.95 r0.175
  lines w0.05: -1.1,-0.6 -1.12,-0.6 -1.12,-0.4 -1.1,-0.4 ; -1.1,0.4 -1.12,0.4 -1.12,0.6 -1.1,0.6 ; -0.775,-1.25 -0.775,-1.27 -0.525,-1.27 -0.525,-1.25 ; -0.775,1.25 -0.775,1.27 -0.525,1.27 -0.525,1.25 ; -0.125,-1.25 -0.125,-1.27 0.125,-1.27 0.125,-1.25 ; -0.125,1.25 -0.125,1.27 0.125,1.27 0.125,1.25 ; 0.525,-1.25 0.525,-1.27 0.775,-1.27 0.775,-1.25 ; 0.525,1.25 0.525,1.27 0.775,1.27 0.775,1.25 ; 1.1,-0.6 1.12,-0.6 1.12,-0.4 1.1,-0.4 ; 1.1,0.4 1.12,0.4 1.12,0.6 1.1,0.6 ; -1.1,-1.25 -1.1,1.25 1.1,1.25 1.1,-1.25 -1.1,-1.25
  text ".Designator" at 0.226,-2.252 h1
3D body "NGF0006A.x_t": height 0.82, standoff 0, extent -1.12,-1.27 1.12,1.27

## WSON8 [mm] "WSON8, 8mm x 6mm, pitch 1.27mm"
height 0.8
pads (9):
  oval 0.8x0.4 smd paste+0 mask+0.05: 1(-3.9,1.905) 2(-3.9,0.635) 3(-3.9,-0.635) 4(-3.9,-1.905) 5(3.9,-1.905) 6(3.9,-0.635) 7(3.9,0.635) 8(3.9,1.905)
  rrect5% 3.4x4.3 smd paste-2 mask+0.05: EP(0,0)
Top Overlay:
  circle w0.25: c-4.7,3 r0.125
  lines w0.2: -4.2,-2.5 -4.2,-3.2 4.2,-3.2 4.2,-2.5 ; -4.2,2.5 -4.2,3.2 4.2,3.2 4.2,2.5
Top Paste:
  rectangle: 0.7,-2.05 1.5,-1.25
  rectangle: -1.5,-2.05 -0.7,-1.25
  rectangle: -0.4,-2.05 0.4,-1.25
  rectangle: 0.7,-0.95 1.5,-0.15
  rectangle: -1.5,-0.95 -0.7,-0.15
  rectangle: -0.4,-0.95 0.4,-0.15
  rectangle: 0.7,1.25 1.5,2.05
  rectangle: 0.7,0.15 1.5,0.95
  rectangle: -1.5,1.25 -0.7,2.05
  rectangle: -0.4,1.25 0.4,2.05
  rectangle: -1.5,0.15 -0.7,0.95
  rectangle: -0.4,0.15 0.4,0.95
Top Courtyard:
  lines w0.025: -4.7,-3.4 -4.7,3.4 4.7,3.4 4.7,-3.4 -4.7,-3.4
Top Assembly:
  circle w0.05: c-3.2,2.2 r0.35
  lines w0.05: -4,-2.105 -4.025,-2.105 -4.025,-1.705 -4,-1.705 ; -4,-0.835 -4.025,-0.835 -4.025,-0.435 -4,-0.435 ; -4,0.435 -4.025,0.435 -4.025,0.835 -4,0.835 ; -4,1.705 -4.025,1.705 -4.025,2.105 -4,2.105 ; 4,-2.105 4.025,-2.105 4.025,-1.705 4,-1.705 ; 4,-0.835 4.025,-0.835 4.025,-0.435 4,-0.435 ; 4,0.435 4.025,0.435 4.025,0.835 4,0.835 ; 4,1.705 4.025,1.705 4.025,2.105 4,2.105 ; -4,-3 -4,3 4,3 4,-3 -4,-3
  text ".Designator" at -4.511,-0.453 h2
3D body "WSON8.x_t": height 0.83, standoff 0, extent -4.025,-3 4.025,3

## WSON8_DQF0008A [mm] "WSON, 8-Leads, Body 2.00x2.00mm, Pitch 0.5mm, TI case DQF0008A"
height 0.75
pads (8):
  oval 0.8x0.25 smd paste+0 mask+0.05: 1(-0.8,0.75)
  oval 0.7x0.25 smd paste+0 mask+0.05: 2(-0.85,0.25) 3(-0.85,-0.25) 4(-0.85,-0.75) 5(0.85,-0.75) 6(0.85,-0.25) 7(0.85,0.25) 8(0.85,0.75)
Top Overlay:
  lines w0.2: -1.15,-1.15 -1.15,-1.25 1.15,-1.25 1.15,-1.15 ; -1.15,1.15 -1.15,1.25 1.15,1.25 1.15,1.15
Top Courtyard:
  lines w0.025: -1.55,-1.35 1.55,-1.35 1.55,1.35 -1.55,1.35 -1.55,-1.35
Top Assembly:
  circle w0.05: c-0.7,0.7 r0.15
  lines w0.05: -1,-0.875 -1.02,-0.875 -1.02,-0.625 -1,-0.625 ; -1,-0.375 -1.02,-0.375 -1.02,-0.125 -1,-0.125 ; -1,0.125 -1.02,0.125 -1.02,0.375 -1,0.375 ; -1,0.625 -1.02,0.625 -1.02,0.875 -1,0.875 ; 1,-0.875 1.02,-0.875 1.02,-0.625 1,-0.625 ; 1,-0.375 1.02,-0.375 1.02,-0.125 1,-0.125 ; 1,0.125 1.02,0.125 1.02,0.375 1,0.375 ; 1,0.625 1.02,0.625 1.02,0.875 1,0.875 ; -1,-1 1,-1 1,1 -1,1 -1,-1
  text ".Designator" at -4.511,-0.453 h2
3D body "WSON8_DQF0008A.x_t": height 0.78, standoff 0.01, extent -1.02,-1 1.02,1

## WSON8_DSG0008A [mm] "WSON, 8-Leads, Body 2.00x2.00mm, Pitch 0.5mm, TI case DSG0008A"
height 0.75
pads (9):
  oval 0.5x0.25 smd paste+0 mask+0.05: 1(-0.95,0.75) 2(-0.95,0.25) 3(-0.95,-0.25) 4(-0.95,-0.75) 5(0.95,-0.75) 6(0.95,-0.25) 7(0.95,0.25) 8(0.95,0.75)
  rrect5% 0.9x1.6 smd paste-2 mask+0.05: EP(0,0)
Top Overlay:
  lines w0.2: -1.15,-1.15 -1.15,-1.25 1.15,-1.25 1.15,-1.15 ; -1.15,1.15 -1.15,1.25 1.15,1.25 1.15,1.15
Top Paste:
  rectangle: -0.4,-0.75 0.4,-0.15
  rectangle: -0.4,0.15 0.4,0.75
Top Courtyard:
  lines w0.025: -1.55,-1.35 1.55,-1.35 1.55,1.35 -1.55,1.35 -1.55,-1.35
Top Assembly:
  circle w0.05: c-0.7,0.7 r0.15
  lines w0.05: -1,-0.875 -1.02,-0.875 -1.02,-0.625 -1,-0.625 ; -1,-0.375 -1.02,-0.375 -1.02,-0.125 -1,-0.125 ; -1,0.125 -1.02,0.125 -1.02,0.375 -1,0.375 ; -1,0.625 -1.02,0.625 -1.02,0.875 -1,0.875 ; 1,-0.875 1.02,-0.875 1.02,-0.625 1,-0.625 ; 1,-0.375 1.02,-0.375 1.02,-0.125 1,-0.125 ; 1,0.125 1.02,0.125 1.02,0.375 1,0.375 ; 1,0.625 1.02,0.625 1.02,0.875 1,0.875 ; -1,-1 1,-1 1,1 -1,1 -1,-1
  text ".Designator" at -4.511,-0.453 h2
3D body "WSON8_DSG0008A.x_t": height 0.78, standoff 0.01, extent -1.02,-1.02 1.02,1.02

## WSON10_DSC0010J [mm] "WSON, 10-Leads, Body 3.00x3.00mm, Pitch 0.5mm, TI case DSC0010J"
height 0.8
pads (11):
  rect 0.6x0.24 smd paste+0 mask+0.05: 1(-1.4,1)
  oval 0.6x0.24 smd paste+0 mask+0.05: 2(-1.4,0.5) 3(-1.4,0) 4(-1.4,-0.5) 5(-1.4,-1) 6(1.4,-1) 7(1.4,-0.5) 8(1.4,0) 9(1.4,0.5) 10(1.4,1)
  round 0.025 smd paste-3 mask+0.05: EP(0,0)
Top Layer:
  region: -0.375,1.575 -0.375,1.2 -0.725,1.2 -0.745,1.2 -0.782,1.185 -0.81,1.157 -0.825,1.12 -0.825,1.1 -0.825,-1.1 -0.825,-1.12 -0.81,-1.157 -0.782,-1.185 -0.745,-1.2 -0.725,-1.2 -0.375,-1.2 -0.375,-1.575 -0.375,-1.6 -0.356,-1.646 -0.321,-1.681 -0.275,-1.7 -0.25,-1.7 -0.225,-1.7 -0.179,-1.681 -0.144,-1.646 -0.125,-1.6 -0.125,-1.575 -0.125,-1.2 0.125,-1.2 0.125,-1.575 0.125,-1.6 0.144,-1.646 0.179,-1.681 0.225,-1.7 0.25,-1.7 0.275,-1.7 0.321,-1.681 0.356,-1.646 0.375,-1.6 0.375,-1.575 0.375,-1.2 0.725,-1.2 0.745,-1.2 0.782,-1.185 0.81,-1.157 0.825,-1.12 0.825,-1.1 0.825,1.1 0.825,1.12 0.81,1.157 0.782,1.185 0.745,1.2 0.725,1.2 0.375,1.2 0.375,1.575 0.375,1.6 0.356,1.646 0.321,1.681 0.275,1.7 0.25,1.7 0.225,1.7 0.179,1.681 0.144,1.646 0.125,1.6 0.125,1.575 0.125,1.2 -0.125,1.2 -0.125,1.575 -0.125,1.6 -0.144,1.646 -0.179,1.681 -0.225,1.7 -0.25,1.7 -0.275,1.7 -0.321,1.681 -0.356,1.646 -0.375,1.6
Top Overlay:
  circle w0.25: c-2.2,1.2 r0.125
  lines w0.2: -1.7,-1.375 -1.7,-1.7 -0.625,-1.7 ; -1.7,1.375 -1.7,1.7 -0.625,1.7 ; 0.625,-1.7 1.7,-1.7 1.7,-1.375 ; 0.625,1.7 1.7,1.7 1.7,1.375
Top Paste:
  region: 0.775,1.15 -0.775,1.15 -0.775,0.15 0.775,0.15
  region: 0.775,-0.15 -0.775,-0.15 -0.775,-1.15 0.775,-1.15
Top Courtyard:
  lines w0.025: -2,-2 2,-2 2,2 -2,2 -2,-2
Top Assembly:
  circle w0.05: c-1,1 r0.25
  lines w0.05: -1.5,-1.12 -1.52,-1.12 -1.52,-0.88 -1.5,-0.88 ; -1.5,-0.62 -1.52,-0.62 -1.52,-0.38 -1.5,-0.38 ; -1.5,-0.12 -1.52,-0.12 -1.52,0.12 -1.5,0.12 ; -1.5,0.38 -1.52,0.38 -1.52,0.62 -1.5,0.62 ; -1.5,0.88 -1.52,0.88 -1.52,1.12 -1.5,1.12 ; -0.365,-1.5 -0.365,-1.52 -0.135,-1.52 -0.135,-1.5 ; -0.365,1.5 -0.365,1.52 -0.135,1.52 -0.135,1.5 ; 0.135,-1.5 0.135,-1.52 0.365,-1.52 0.365,-1.5 ; 0.135,1.5 0.135,1.52 0.365,1.52 0.365,1.5 ; 1.5,-1.12 1.52,-1.12 1.52,-0.88 1.5,-0.88 ; 1.5,-0.62 1.52,-0.62 1.52,-0.38 1.5,-0.38 ; 1.5,-0.12 1.52,-0.12 1.52,0.12 1.5,0.12 ; 1.5,0.38 1.52,0.38 1.52,0.62 1.5,0.62 ; 1.5,0.88 1.52,0.88 1.52,1.12 1.5,1.12 ; -1.5,-1.5 -1.5,1.5 1.5,1.5 1.5,-1.5 -1.5,-1.5
  text ".Designator" at -4.511,-0.453 h2
3D body "WSON10_DSC0010J.x_t": height 0.82, standoff 0, extent -1.52,-1.52 1.52,1.52